# Altium footprint library PMP41115.PcbLib: 53 footprints (part 4 of 4)
Each footprint in its own frame and in the unit in brackets; x right, y up, seen from the top. Pads: shape width x height; smd on the part's side, far side on the other; paste and mask are expansions set on the pad; w line width, h text height; cw(c..) or ccw(c..) is an arc to the next point about the centre after c.
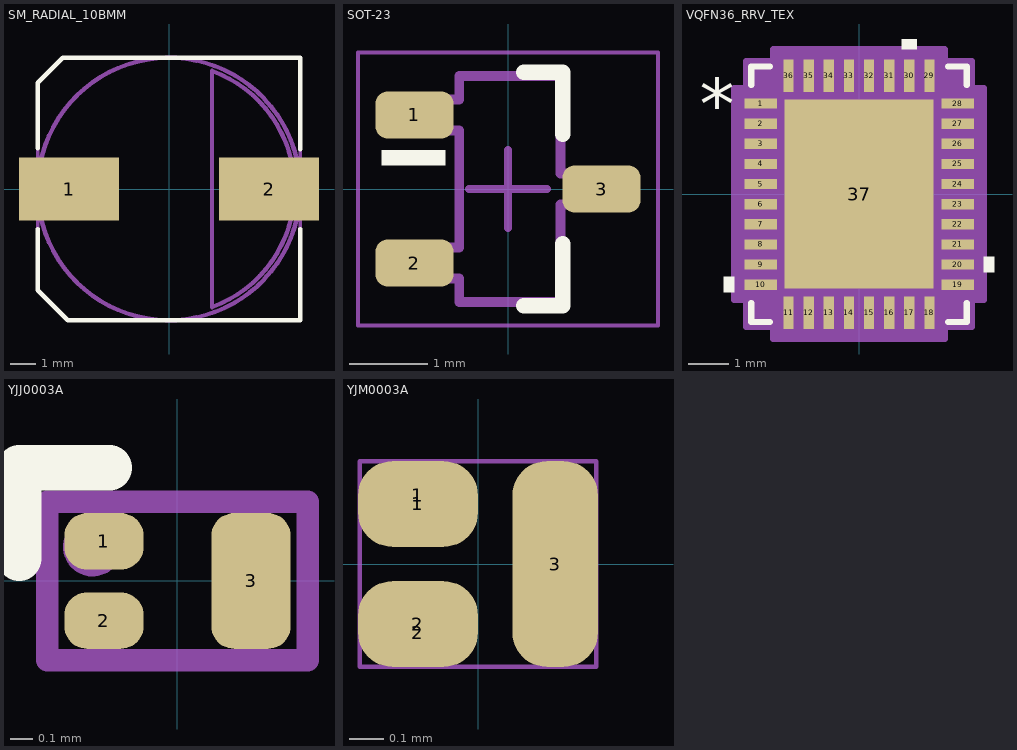
[diagram p3: the footprints below, top view; thin cyan lines are the x and y axes]

## SM_RADIAL_10BMM [mm] "Nichicon 10x10"
height 10.5
pads (2):
  rect 4x2.5 smd: 1(-4,0) 2(4,0)
Top Overlay:
  lines w0.178: -5.25,-1.6 -5.25,-4.046 -4.046,-5.25 5.25,-5.25 5.25,-1.6 ; -5.25,1.624 -5.25,4.25 -4.25,5.25 5.25,5.25 5.25,1.597
Mechanical 5:
  lines w0.127: -5.25,-4.046 -5.25,4.25 -4.25,5.25 5.25,5.25 5.25,-5.25 -4.046,-5.25 -5.25,-4.046
  text ".Designator" at -1.524,-0.508 h1.02
Mechanical 13:
  circle w0.178: c0,0 r5.25
  lines w0.178: 1.72,-4.725 ccw(c0,0) 1.72,4.725 1.72,-4.725
3D body: height 1, standoff 0, extent -5.251,-5.251 5.251,5.251
3D body: height 10.5, standoff 10.4, extent 1.719,-4.725 5.028,4.725
3D body: height 10.5, standoff 1, extent -5.249,-5.249 5.249,5.249

## SOT-23 [mm] "SOT23, 3-Leads, Body 2.9x1.3mm, Pitch 0.95mm, Lead Span 2.5mm, IPC Medium Density"
height 1.1
pads (3):
  rrect50% 1x0.6 smd: 1(-1.2,0.95) 2(-1.2,-0.95) 3(1.2,0)
Top Overlay:
  rectangle: -1.625,0.3 -0.8,0.5
  lines w0.2: 0.2,-1.5 0.7,-1.5 0.7,-0.7 ; 0.2,1.5 0.7,1.5 0.7,0.7
Mechanical 5:
  lines w0.127: -1.16,-1.15 -0.625,-1.15 -0.625,-1.45 0.675,-1.45 0.675,-0.2 1.21,-0.2 1.21,0.2 0.675,0.2 0.675,1.45 -0.625,1.45 -0.625,1.15 -1.16,1.15 -1.16,0.75 -0.625,0.75 -0.625,-0.75 -1.16,-0.75 -1.16,-1.15
  text ".Designator" at -0.175,1.225 h0.64
Mechanical 15:
  lines w0.05: -1.925,-1.75 -1.925,1.75 1.925,1.75 1.925,-1.75 -1.925,-1.75
  lines w0.1: -0.5,0 0.5,0 ; 0,-0.5 0,0.5
3D body "SW3dPS-sot-3p290x130ll237h100.STEP": height 1, standoff 0, extent -1.16,-1.45 1.21,1.45

## VQFN36_RRV_TEX [mil]
pads (37):
  rect 31.81x10.03 smd paste+0 mask+0: 1(-96.41,88.61) 2(-96.41,68.92) 3(-96.41,49.23) 4(-96.41,29.54) 5(-96.41,9.85) 6(-96.41,-9.85) 7(-96.41,-29.54) 8(-96.41,-49.23) 9(-96.41,-68.92) 10(-96.41,-88.61) 19(96.41,-88.61) 20(96.41,-68.92) 21(96.41,-49.23) 22(96.41,-29.54) 23(96.41,-9.85) 24(96.41,9.85) 25(96.41,29.54) 26(96.41,49.23) 27(96.41,68.92) 28(96.41,88.61)
  rect 10.03x31.81 smd paste+0 mask+0: 11(-68.92,-115.91) 12(-49.23,-115.91) 13(-29.54,-115.91) 14(-9.85,-115.91) 15(9.85,-115.91) 16(29.54,-115.91) 17(49.23,-115.91) 18(68.92,-115.91) 29(68.92,115.91) 30(49.23,115.91) 31(29.54,115.91) 32(9.85,115.91) 33(-9.85,115.91) 34(-29.54,115.91) 35(-49.23,115.91) 36(-68.92,115.91)
  rect 146x185 smd paste+0 mask+0: 37(0,0)
Top Overlay:
  region: 56.73,141.81 41.73,141.81 41.73,151.81 56.73,151.81
  region: 122.31,-61.41 132.31,-61.41 132.31,-76.42 122.31,-76.42
  region: -122.31,-81.11 -132.31,-81.11 -132.31,-96.11 -122.31,-96.11
  lines w6: -105.5,-106.72 -105.5,-125 -87.03,-125 ; -105.5,106.72 -105.5,125 -87.03,125 ; 87.03,-125 105.5,-125 105.5,-106.72 ; 87.03,125 105.5,125 105.5,106.72
  text ".Designator" at -137.5,-25 h50
  text "*" at -155.81,63.6 h50
Mechanical 13:
  lines w1: -100.5,70 -50.5,120 ; -100.5,-120 -100.5,120 100.5,120 100.5,-120 -100.5,-120 ; -100.5,-94.61 -100.5,-82.61 -100.5,-94.61 ; -100.5,-74.92 -100.5,-62.91 -100.5,-74.92 ; -100.5,-55.23 -100.5,-43.23 -100.5,-55.23 ; -100.5,-35.53 -100.5,-23.54 -100.5,-35.53 ; -100.5,-15.85 -100.5,-3.85 -100.5,-15.85 ; -100.5,3.85 -100.5,15.85 -100.5,3.85 ; -100.5,23.54 -100.5,35.53 -100.5,23.54 ; -100.5,43.23 -100.5,55.23 -100.5,43.23 ; -100.5,62.91 -100.5,74.92 -100.5,62.91 ; -100.5,82.61 -100.5,94.61 -100.5,82.61 ; -74.92,-120 -62.91,-120 -74.92,-120 ; -74.92,120 -62.91,120 -74.92,120 ; -55.23,-120 -43.23,-120 -55.23,-120 ; -55.23,120 -43.23,120 -55.23,120 ; -35.53,-120 -23.54,-120 -35.53,-120 ; -35.53,120 -23.54,120 -35.53,120 ; -15.85,-120 -3.85,-120 -15.85,-120 ; -15.85,120 -3.85,120 -15.85,120 ; 3.85,-120 15.85,-120 3.85,-120 ; 3.85,120 15.85,120 3.85,120 ; 23.54,-120 35.53,-120 23.54,-120 ; 23.54,120 35.53,120 23.54,120 ; 43.23,-120 55.23,-120 43.23,-120 ; 43.23,120 55.23,120 43.23,120 ; 62.91,-120 74.92,-120 62.91,-120 ; 62.91,120 74.92,120 62.91,120 ; 100.5,-94.61 100.5,-82.61 100.5,-94.61 ; 100.5,-74.92 100.5,-62.91 100.5,-74.92 ; 100.5,-55.23 100.5,-43.23 100.5,-55.23 ; 100.5,-35.53 100.5,-23.54 100.5,-35.53 ; 100.5,-15.85 100.5,-3.85 100.5,-15.85 ; 100.5,3.85 100.5,15.85 100.5,3.85 ; 100.5,23.54 100.5,35.53 100.5,23.54 ; 100.5,43.23 100.5,55.23 100.5,43.23 ; 100.5,62.91 100.5,74.92 100.5,62.91 ; 100.5,82.61 100.5,94.61 100.5,82.61
  text "*" at -62,63.6 h50
  text ".Designator" at -137.5,-25 h50
Mechanical 15:
  region: -83.93,-130 -110.5,-130 -110.5,-103.62 -122.31,-103.62 -122.31,103.62 -110.5,103.62 -110.5,130 -83.93,130 -83.93,141.81 83.93,141.81 83.93,130 110.5,130 110.5,103.62 122.31,103.62 122.31,-103.62 110.5,-103.62 110.5,-130 83.93,-130 83.93,-141.81 -83.93,-141.81
  lines w6: -122.31,-103.62 -122.31,103.62 -110.5,103.62 -110.5,130 -83.93,130 -83.93,141.81 83.93,141.81 83.93,130 110.5,130 110.5,103.62 122.31,103.62 122.31,-103.62 110.5,-103.62 110.5,-130 83.93,-130 83.93,-141.81 -83.93,-141.81 -83.93,-130 -110.5,-130 -110.5,-103.62 -122.31,-103.62
3D body "VQFN36_RRV_TEX.step": height 39.09, standoff 0, extent -100.51,-120 100.51,120

## YJJ0003A [mm] "SMD, 3-Leads, Body 1x0.6mm"
height 0.22
pads (3):
  rrect80% 0.35x0.25 smd mask-0.05: 1(-0.325,0.175) 2(-0.325,-0.175)
  rrect57% 0.35x0.6 smd mask-0.05: 3(0.325,0)
Top Overlay:
  lines w0.2: -0.7,0.1 -0.7,0.5 -0.3,0.5
Mechanical 5:
  circle w0.1: c-0.375,0.15 r0.08
  lines w0.1: -0.575,-0.35 -0.575,0.35 0.575,0.35 0.575,-0.35 -0.575,-0.35
  text ".Designator'" at -0.4,-0.275 h0.45
3D body: height 0.22, standoff 0.22, extent -0.299,0.001 -0.101,0.199
3D body "YJJ0003A.stp": height 0.22, standoff 0, extent -0.5,-0.3 0.5,0.3

## YJM0003A [mm] "SMT, 3-Leads, Body 0.69x0.6mm"
height 0.35
pads (5):
  rrect80% 0.35x0.25 smd paste-0.2 mask-0.05: 1(-0.175,0.175) 2(-0.175,-0.175)
  rrect50% 0.25x0.2 on Top Paste: 1(-0.175,0.2) 2(-0.175,-0.2)
  rrect80% 0.25x0.6 smd paste-0.05 mask-0.05: 3(0.225,0)
Mechanical 5:
  circle w0.013: c-0.25,0.2 r0.05
  lines w0.013: -0.345,-0.3 -0.345,0.3 0.345,0.3 0.345,-0.3 -0.345,-0.3
  text ".Designator" at -0.2,-0.025 h0.1
3D body "YJM0003A.stp": height 0.35, standoff 0, extent -0.345,-0.3 0.345,0.3